# Altium integrated library CC2538+CC2592.IntLib: 1 symbol
Pins are listed as number, name and electrical type; pins without a type are passive.

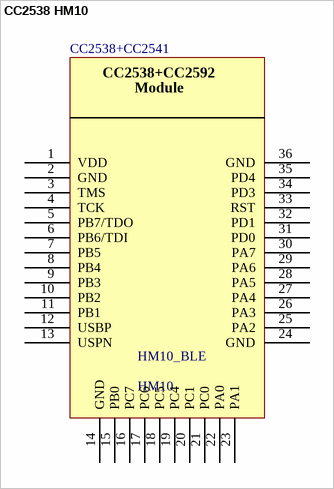
[diagram p0: symbol CC2538 HM10]

## CC2538 HM10
designator HM10_BLE, comment HM10
BLE HM10
footprint CC2538+CC2541
pins: 1 VDD, 2 GND, 3 TMS, 4 TCK, 5 PB7/TDO, 6 PB6/TDI, 7 PB5, 8 PB4, 9 PB3, 10 PB2, 11 PB1, 12 USBP, 13 USPN, 14 GND, 15 PB0, 16 PC7, 17 PC6, 18 PC5, 19 PC4, 20 PC1, 21 PC0, 22 PA0, 23 PA1, 24 GND, 25 PA2, 26 PA3, 27 PA4, 28 PA5, 29 PA6, 30 PA7, 31 PD0, 32 PD1, 33 RST, 34 PD3, 35 PD4, 36 GND
text: CC2538+CC2541; CC2538+CC2592; Module